# Altium schematic symbol library shotky_diode_1N5882_schematic_symbol.SchLib: 1 symbol
Pins are listed as number, name and electrical type; pins without a type are passive.

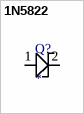
[diagram p0: symbol 1N5822]

## 1N5822
designator Q?
Schotky diode
footprint 1N5882 schotky diode
pins: 1 GND16, 2 GND17